# Altium footprint library SamacSys.PcbLib: 1008 footprints (part 35 of 63)
Each footprint in its own frame and in the unit in brackets; x right, y up, seen from the top. Pads: shape width x height; smd on the part's side, far side on the other; paste and mask are expansions set on the pad; w line width, h text height; cw(c..) or ccw(c..) is an arc to the next point about the centre after c.
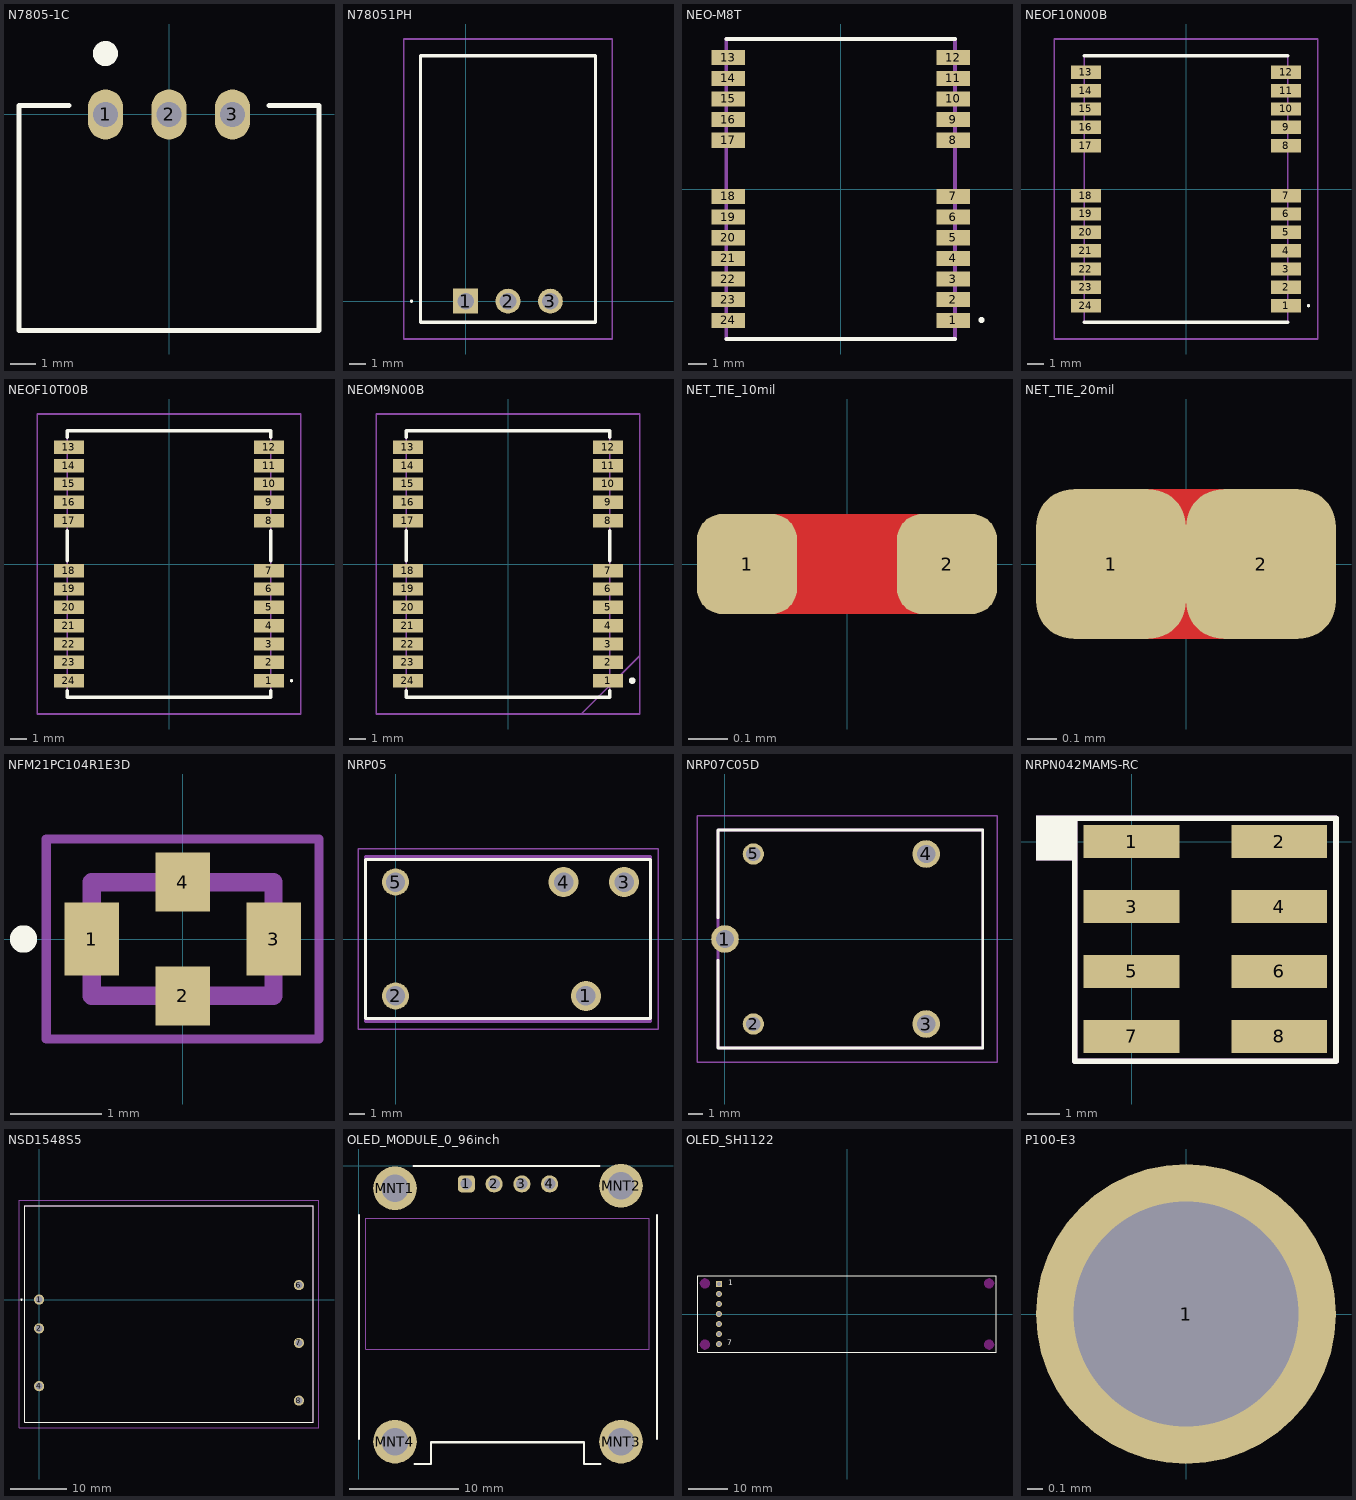
[diagram p34: the footprints below, top view; thin cyan lines are the x and y axes]

## N7805-1C [mm]
height 6
pads (3):
  oval 1.4x2 hole 1: 1(-2.54,0) 2(0,0) 3(2.54,0)
Top Overlay:
  circle w0.5: c-2.54,2.438 r0.25
  lines w0.2: -4,0.35 -6,0.35 -6,-8.65 6,-8.65 6,0.35 4,0.35
3D body "N7805-1C.stp": height 17.5, standoff -4.08, extent -5.75,-8.65 5.75,0.35

## N78051PH [mm]
pads (3):
  rect 1.5x1.5 hole 1: 1(0,0)
  round 1.5 hole 1: 2(2.54,0) 3(5.08,0)
Top Overlay:
  lines w0.1: -3.3,0 ccw(c-3.25,0) -3.2,0 ccw(c-3.25,0) -3.3,0
  lines w0.2: -2.71,-1.27 -2.71,14.73 7.79,14.73 7.79,-1.27 -2.71,-1.27
Assembly:
  lines w0.1: -2.71,-1.27 -2.71,14.73 7.79,14.73 7.79,-1.27 -2.71,-1.27
Countryard:
  lines w0.1: -3.71,-2.27 -3.71,15.73 8.79,15.73 8.79,-2.27 -3.71,-2.27
3D body "N7805-1PH.stp": height 7.6, standoff -5, extent -2.71,-1.27 7.79,14.73

## NEO-M8T [mm]
pads (24):
  rect 1.8x0.8 smd: 1(6,-7) 2(6,-5.9) 3(6,-4.8) 4(6,-3.7) 5(6,-2.6) 6(6,-1.5) 7(6,-0.4) 8(6,2.6) 9(6,3.7) 10(6,4.8) 11(6,5.9) 12(6,7) 13(-6,7) 14(-6,5.9) 15(-6,4.8) 16(-6,3.7) 17(-6,2.6) 18(-6,-0.4) 19(-6,-1.5) 20(-6,-2.6) 21(-6,-3.7) 22(-6,-4.8) 23(-6,-5.9) 24(-6,-7)
Top Overlay:
  circle w0.2: c7.514,-6.988 r0.062
  lines w0.2: -6.1,-8 6.1,-8 ; -6.1,8 6.1,8
Assembly:
  lines w0.2: -6.1,-8 -6.1,8 6.1,8 6.1,-8 -6.1,-8
3D body "NEO-M8N-0.stp": height 2.6, standoff 0, extent -6.1,-8 6.1,8

## NEOF10N00B [mm]
pads (24):
  rect 1.8x0.8 smd: 1(6,-7) 2(6,-5.9) 3(6,-4.8) 4(6,-3.7) 5(6,-2.6) 6(6,-1.5) 7(6,-0.4) 8(6,2.6) 9(6,3.7) 10(6,4.8) 11(6,5.9) 12(6,7) 13(-6,7) 14(-6,5.9) 15(-6,4.8) 16(-6,3.7) 17(-6,2.6) 18(-6,-0.4) 19(-6,-1.5) 20(-6,-2.6) 21(-6,-3.7) 22(-6,-4.8) 23(-6,-5.9) 24(-6,-7)
Top Overlay:
  lines w0.1: 7.3,-7 ccw(c7.35,-7) 7.4,-7 ccw(c7.35,-7) 7.3,-7
  lines w0.2: -6.1,-8 6.1,-8 ; -6.1,8 6.1,8
Assembly:
  lines w0.1: -6.1,-8 -6.1,8 6.1,8 6.1,-8 -6.1,-8
Countryard:
  lines w0.1: -7.9,-9 -7.9,9 7.9,9 7.9,-9 -7.9,-9
3D body "NEO-F10N-00B.stp": height 2.4, standoff 0, extent -6.1,-8 6.1,8

## NEOF10T00B [mm]
pads (24):
  rect 1.8x0.8 smd: 1(6,-7) 2(6,-5.9) 3(6,-4.8) 4(6,-3.7) 5(6,-2.6) 6(6,-1.5) 7(6,-0.4) 8(6,2.6) 9(6,3.7) 10(6,4.8) 11(6,5.9) 12(6,7) 13(-6,7) 14(-6,5.9) 15(-6,4.8) 16(-6,3.7) 17(-6,2.6) 18(-6,-0.4) 19(-6,-1.5) 20(-6,-2.6) 21(-6,-3.7) 22(-6,-4.8) 23(-6,-5.9) 24(-6,-7)
Top Overlay:
  lines w0.1: 7.3,-7 ccw(c7.35,-7) 7.4,-7 ccw(c7.35,-7) 7.3,-7
  lines w0.2: -6.1,-7.6 -6.1,-8 6.1,-8 6.1,-7.6 ; -6.1,0.2 -6.1,2 ; -6.1,7.6 -6.1,8 6.1,8 6.1,7.6 ; 6.1,0.2 6.1,2
Assembly:
  lines w0.1: -6.1,-8 -6.1,8 6.1,8 6.1,-8 -6.1,-8
Countryard:
  lines w0.1: -7.9,-9 -7.9,9 7.9,9 7.9,-9 -7.9,-9
3D body "NEO-F10T-00B.stp": height 2.6, standoff 0, extent -6.1,-8 6.1,8

## NEOM9N00B [mm]
pads (24):
  rect 1.8x0.8 smd: 1(6,-7) 2(6,-5.9) 3(6,-4.8) 4(6,-3.7) 5(6,-2.6) 6(6,-1.5) 7(6,-0.4) 8(6,2.6) 9(6,3.7) 10(6,4.8) 11(6,5.9) 12(6,7) 13(-6,7) 14(-6,5.9) 15(-6,4.8) 16(-6,3.7) 17(-6,2.6) 18(-6,-0.4) 19(-6,-1.5) 20(-6,-2.6) 21(-6,-3.7) 22(-6,-4.8) 23(-6,-5.9) 24(-6,-7)
Top Overlay:
  lines w0.2: -6.1,-7.6 -6.1,-8 6.1,-8 6.1,-7.6 ; -6.1,0.2 -6.1,2 ; -6.1,7.6 -6.1,8 6.1,8 6.1,7.6 ; 6.1,0.2 6.1,2 ; 7.35,-7 ccw(c7.45,-7) 7.55,-7 ccw(c7.45,-7) 7.35,-7
Top Courtyard:
  lines w0.05: 4.075,-9 4.4,-9
  lines w0.1: 4.4,-9 7.9,-5.5
Assembly:
  lines w0.1: -6.1,-8 6.1,-8 6.1,8 -6.1,8 -6.1,-8
Countryard:
  lines w0.1: -7.9,-9 7.9,-9 7.9,9 -7.9,9 -7.9,-9
3D body "NEO-M9N-00B.stp": height 2.6, standoff 0, extent -6.1,-8 6.1,8

## NET_TIE_10mil [mil]
pads (2):
  rrect50% 10x10 smd mask+4: 1(-10,0) 2(10,0)
Top Layer:
  rectangle: -10,-5 10,5

## NET_TIE_20mil [mil]
pads (2):
  rrect50% 20x20 smd mask+4: 1(-10,0) 2(10,0)
Top Layer:
  rectangle: -10,-10 10,10

## NFM21PC104R1E3D [mm]
pads (4):
  rect 0.6x0.8 smd: 1(-1,0) 3(1,0)
  rect 0.6x0.65 smd: 2(0,-0.625) 4(0,0.625)
Top Overlay:
  circle w0.2: c-1.75,0 r0.05
  lines w0.2: -1.8,0 cw(c-1.75,0) -1.7,0 cw(c-1.75,0) -1.8,0
Assembly:
  lines w0.2: -1,-0.625 1,-0.625 1,0.625 -1,0.625 -1,-0.625
Countryard:
  lines w0.1: -1.5,-1.1 1.5,-1.1 1.5,1.1 -1.5,1.1 -1.5,-1.1
3D body "NFM21PC104R1E3D.stp": height 0.85, standoff 0, extent -1,-0.625 1,0.625

## NRP05 [mm]
pads (5):
  round 2 hole 1.3: 1(12.7,-3.8) 3(15.24,3.8) 4(11.2,3.8)
  round 1.8 hole 1.3: 2(0,-3.8) 5(0,3.8)
Top Overlay:
  lines w0.2: -2,-5.3 -2,5.3 17,5.3 17,-5.3 -2,-5.3
Assembly:
  lines w0.2: -2,-5.5 17,-5.5 17,5.5 -2,5.5 -2,-5.5
Countryard:
  lines w0.1: -2.5,-6 17.5,-6 17.5,6 -2.5,6 -2.5,-6
3D body "Relay_NRP05-A-xxx.STEP": height 16, standoff -3.6, extent -1.9,-5.3 16.9,5.3

## NRP07C05D [mm]
pads (5):
  round 1.95 hole 1.3: 1(0,0) 3(14.2,-6) 4(14.2,6)
  round 1.5 hole 1: 2(2,-6) 5(2,6)
Top Overlay:
  lines w0.2: -0.5,-1.5 -0.5,-7.7 18.2,-7.7 18.2,7.7 -0.5,7.7 -0.5,1.5
Assembly:
  lines w0.2: -0.5,-7.7 -0.5,7.7 18.2,7.7 18.2,-7.7 -0.5,-7.7
Countryard:
  lines w0.1: -1.975,-8.7 -1.975,8.7 19.2,8.7 19.2,-8.7 -1.975,-8.7
3D body "NRP-07-C-05D.stp": height 16, standoff -5, extent -0.55,-7.7 18.2,7.7

## NRPN042MAMS-RC [mm] "MALE_P2MM_8POS_2ROW"
height 5.8
pads (8):
  rect 2.95x1.02 smd: 1(0,0) 2(4.55,0) 3(0,-2) 4(4.55,-2) 5(0,-4) 6(4.55,-4) 7(0,-6) 8(4.55,-6)
Top Overlay:
  rectangle: -2.946,-0.584 -1.778,0.813
  lines w0.178: -1.753,-6.768 -1.753,0.725 6.301,0.725 6.301,-6.768 -1.753,-6.768
3D Body:
  rectangle: -2.946,-0.584 -1.778,0.813
  lines w0.178: -1.753,-6.768 -1.753,0.725 6.301,0.725 6.301,-6.768 -1.753,-6.768
3D body "_ _ _N042MAMS-RC.STEP": height 5.81, standoff 0.01, extent -1.016,-7.048 5.484,0.952

## NSD1548S5 [mm]
pads (6):
  round 1.8 hole 1.2: 1(0,0) 2(0,-5.08) 4(0,-15.24) 6(45.72,2.54) 7(45.72,-7.62) 8(45.72,-17.78)
Top Overlay:
  lines w0.1: -2.54,-21.59 -2.54,16.51 48.26,16.51 48.26,-21.59 -2.54,-21.59
  lines w0.2: -3.2,0 ccw(c-3.1,0) -3,0 ccw(c-3.1,0) -3.2,0
Assembly:
  lines w0.2: -2.54,-21.59 -2.54,16.51 48.26,16.51 48.26,-21.59 -2.54,-21.59
Countryard:
  lines w0.1: -3.54,-22.59 -3.54,17.51 49.26,17.51 49.26,-22.59 -3.54,-22.59
3D body "NSD15-48S5.stp": height 9.92, standoff -5, extent -2.54,-21.59 48.26,16.51

## OLED_MODULE_0_96inch [mm]
pads (8):
  rrect50% 1.575x1.575 hole 1.05: 1(9.84,-1.65)
  round 1.575 hole 1.05: 2(12.38,-1.65) 3(14.92,-1.65) 4(17.46,-1.65)
  round 4 hole 2.5: MNT1(3.3,-2.05) MNT2(24,-1.825) MNT3(24,-25.25) MNT4(3.3,-25.25)
Top Overlay:
  lines w0.2: 0,-25 0,-4.5 ; 5,0 22,0 ; 5.1,-27.3 6.6,-27.3 6.6,-25.3 20.6,-25.3 20.6,-27.3 22.1,-27.3 ; 27.3,-25 27.3,-4.5
Assembly:
  lines w0.1: 0.6,-16.8 26.6,-16.8 26.6,-4.8 0.6,-4.8 0.6,-16.8
3D body "User Library-PBS_(DS1023)_1line_connectors_h=5_0_8_5mm_step_2_54mm.step": height 8.5, standoff -3, extent 8.27,-2.9 18.93,-0.4

## OLED_SH1122 [mm]
pads (7):
  rect 1.5x1.5 hole 1.05: 1(-32.45,7.62)
  round 1.5 hole 1.05: 2(-32.45,5.08) 3(-32.45,2.54) 4(-32.45,0) 5(-32.45,-2.54) 6(-32.45,-5.08) 7(-32.45,-7.62)
Top Overlay:
  lines w0.2: -37.75,-9.7 37.75,-9.7 37.75,9.7 -37.75,9.7 -37.75,-9.7
  text "1" at -30.133,6.839 h2.4
  text "7" at -30.302,-8.401 h2.4
Keep-Out Layer:
  board cut-out: -36,6.5 -36.123,6.5 -36.365,6.548 -36.592,6.642 -36.797,6.779 -36.971,6.953 -37.108,7.158 -37.202,7.385 -37.25,7.627 -37.25,7.75 -37.25,7.873 -37.202,8.115 -37.108,8.342 -36.971,8.547 -36.797,8.721 -36.592,8.858 -36.365,8.952 -36.123,9 -36,9 -35.877,9 -35.635,8.952 -35.408,8.858 -35.203,8.721 -35.029,8.547 -34.892,8.342 -34.798,8.115 -34.75,7.873 -34.75,7.75 -34.75,7.627 -34.798,7.385 -34.892,7.158 -35.029,6.953 -35.203,6.779 -35.408,6.642 -35.635,6.548 -35.877,6.5
  board cut-out: -36,-9 -36.123,-9 -36.365,-8.952 -36.592,-8.858 -36.797,-8.721 -36.971,-8.547 -37.108,-8.342 -37.202,-8.115 -37.25,-7.873 -37.25,-7.75 -37.25,-7.627 -37.202,-7.385 -37.108,-7.158 -36.971,-6.953 -36.797,-6.779 -36.592,-6.642 -36.365,-6.548 -36.123,-6.5 -36,-6.5 -35.877,-6.5 -35.635,-6.548 -35.408,-6.642 -35.203,-6.779 -35.029,-6.953 -34.892,-7.158 -34.798,-7.385 -34.75,-7.627 -34.75,-7.75 -34.75,-7.873 -34.798,-8.115 -34.892,-8.342 -35.029,-8.547 -35.203,-8.721 -35.408,-8.858 -35.635,-8.952 -35.877,-9
  board cut-out: 36,-6.5 36.123,-6.5 36.365,-6.548 36.592,-6.642 36.797,-6.779 36.971,-6.953 37.108,-7.158 37.202,-7.385 37.25,-7.627 37.25,-7.75 37.25,-7.873 37.202,-8.115 37.108,-8.342 36.971,-8.547 36.797,-8.721 36.592,-8.858 36.365,-8.952 36.123,-9 36,-9 35.877,-9 35.635,-8.952 35.408,-8.858 35.203,-8.721 35.029,-8.547 34.892,-8.342 34.798,-8.115 34.75,-7.873 34.75,-7.75 34.75,-7.627 34.798,-7.385 34.892,-7.158 35.029,-6.953 35.203,-6.779 35.408,-6.642 35.635,-6.548 35.877,-6.5
  board cut-out: 36,9 36.123,9 36.365,8.952 36.592,8.858 36.797,8.721 36.971,8.547 37.108,8.342 37.202,8.115 37.25,7.873 37.25,7.75 37.25,7.627 37.202,7.385 37.108,7.158 36.971,6.953 36.797,6.779 36.592,6.642 36.365,6.548 36.123,6.5 36,6.5 35.877,6.5 35.635,6.548 35.408,6.642 35.203,6.779 35.029,6.953 34.892,7.158 34.798,7.385 34.75,7.627 34.75,7.75 34.75,7.873 34.798,8.115 34.892,8.342 35.029,8.547 35.203,8.721 35.408,8.858 35.635,8.952 35.877,9
Multi-Layer:
  pour cut-out: -36,5.75 -36.197,5.75 -36.583,5.827 -36.947,5.978 -37.275,6.196 -37.554,6.475 -37.772,6.803 -37.923,7.167 -38,7.553 -38,7.75 -38,7.947 -37.923,8.333 -37.772,8.697 -37.554,9.025 -37.275,9.304 -36.947,9.522 -36.583,9.673 -36.197,9.75 -36,9.75 -35.803,9.75 -35.417,9.673 -35.053,9.522 -34.725,9.304 -34.446,9.025 -34.228,8.697 -34.077,8.333 -34,7.947 -34,7.75 -34,7.553 -34.077,7.167 -34.228,6.803 -34.446,6.475 -34.725,6.196 -35.053,5.978 -35.417,5.827 -35.803,5.75
  pour cut-out: -36,-9.75 -36.197,-9.75 -36.583,-9.673 -36.947,-9.522 -37.275,-9.304 -37.554,-9.025 -37.772,-8.697 -37.923,-8.333 -38,-7.947 -38,-7.75 -38,-7.553 -37.923,-7.167 -37.772,-6.803 -37.554,-6.475 -37.275,-6.196 -36.947,-5.978 -36.583,-5.827 -36.197,-5.75 -36,-5.75 -35.803,-5.75 -35.417,-5.827 -35.053,-5.978 -34.725,-6.196 -34.446,-6.475 -34.228,-6.803 -34.077,-7.167 -34,-7.553 -34,-7.75 -34,-7.947 -34.077,-8.333 -34.228,-8.697 -34.446,-9.025 -34.725,-9.304 -35.053,-9.522 -35.417,-9.673 -35.803,-9.75
  pour cut-out: 36,-5.75 36.197,-5.75 36.583,-5.827 36.947,-5.978 37.275,-6.196 37.554,-6.475 37.772,-6.803 37.923,-7.167 38,-7.553 38,-7.75 38,-7.947 37.923,-8.333 37.772,-8.697 37.554,-9.025 37.275,-9.304 36.947,-9.522 36.583,-9.673 36.197,-9.75 36,-9.75 35.803,-9.75 35.417,-9.673 35.053,-9.522 34.725,-9.304 34.446,-9.025 34.228,-8.697 34.077,-8.333 34,-7.947 34,-7.75 34,-7.553 34.077,-7.167 34.228,-6.803 34.446,-6.475 34.725,-6.196 35.053,-5.978 35.417,-5.827 35.803,-5.75
  pour cut-out: 36,9.75 36.197,9.75 36.583,9.673 36.947,9.522 37.275,9.304 37.554,9.025 37.772,8.697 37.923,8.333 38,7.947 38,7.75 38,7.553 37.923,7.167 37.772,6.803 37.554,6.475 37.275,6.196 36.947,5.978 36.583,5.827 36.197,5.75 36,5.75 35.803,5.75 35.417,5.827 35.053,5.978 34.725,6.196 34.446,6.475 34.228,6.803 34.077,7.167 34,7.553 34,7.75 34,7.947 34.077,8.333 34.228,8.697 34.446,9.025 34.725,9.304 35.053,9.522 35.417,9.673 35.803,9.75
3D body "SH1122.SLDPRT": height 6.4, standoff -5, extent -37.75,-9.675 37.75,9.675

## P100-E3 [mm]
pads (1):
  round 2 hole 1.5: 1(0,0)
3D body "P100-E3.STEP": height 30.35, standoff -3, extent -0.893,-0.9 0.894,0.9